# Altium schematic symbol library OPA445AU.SchLib: 1 symbol
Pins are listed as number, name and electrical type; pins without a type are passive.

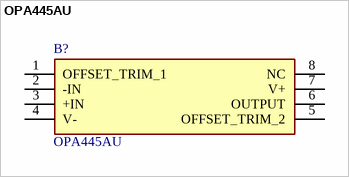
[diagram p0: symbol OPA445AU]

## OPA445AU
designator B?
Operational Amplifiers - Op Amps Hi Voltage FET-Input Op Amp; Manufacturer_Name: Texas Instruments; Geometry.Height: 1.75mm; Mouser Part Number: 595-OPA445AU; Mouser Price/Stock: https://www.mouser.co.uk/ProductDetail/Texas-Instruments/OPA445AU?qs=wgAEGBTxy7lNjLIKPSQ4Sw%3D%3D; Manufacturer_Part_Number: OPA445AU; Datasheet Link: http://www.ti.com/lit/ds/symlink/opa445.pdf
footprint SOIC127P600X175-8N
pins: 1 OFFSET_TRIM_1, 2 -IN, 3 +IN, 4 V-, 5 OFFSET_TRIM_2, 6 OUTPUT, 7 V+, 8 NC